# Altium footprint library huan_basic.PcbLib: 138 footprints (part 5 of 9)
Each footprint in its own frame and in the unit in brackets; x right, y up, seen from the top. Pads: shape width x height; smd on the part's side, far side on the other; paste and mask are expansions set on the pad; w line width, h text height; cw(c..) or ccw(c..) is an arc to the next point about the centre after c.
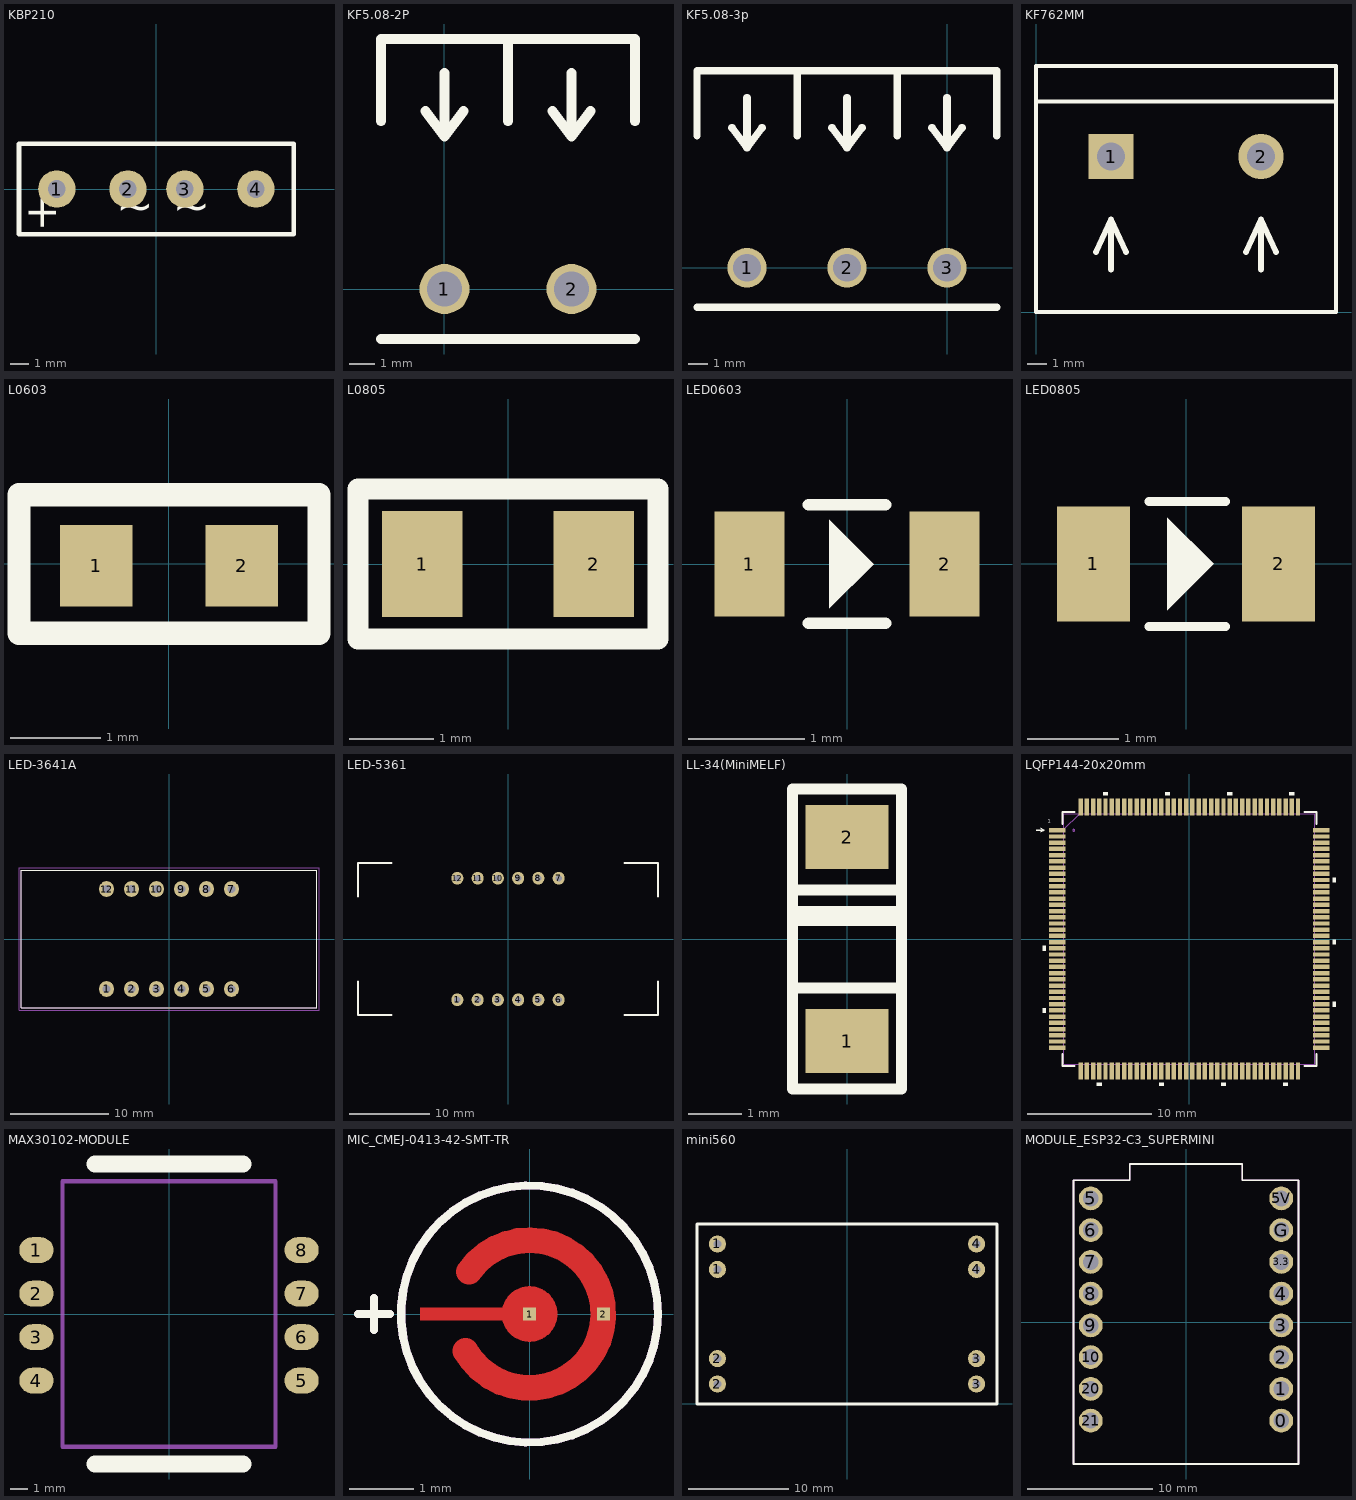
[diagram p4: the footprints below, top view; thin cyan lines are the x and y axes]

## KBP210 [mm]
pads (4):
  round 2 hole 0.94: 1(-5.334,0) 2(-1.524,0) 3(1.524,0) 4(5.334,0)
Top Overlay:
  lines w0.254: -7.36,-2.422 -7.36,2.423 7.36,2.423 7.36,-2.422 -7.36,-2.422
  text "~" at 0.889,-2.341 h3
  text "~" at -2.159,-2.341 h3
  text "-" at 5.715,-1.182 h3
  text "+" at -4.786,-2.286 h3
3D body "KBPM.stp": height 12.19, standoff -3.99, extent -7.36,-2.422 7.36,2.423

## KF5.08-2P [mm]
pads (2):
  round 2 hole 1.4: 1(0,0) 2(5.08,0)
Top Overlay:
  lines w0.381: -2.54,-2 7.62,-2 ; -2.54,6.706 -2.54,10 7.62,10 7.62,6.706 ; 2.54,6.706 2.54,10
  lines w0.4: 4.318,7.112 5.08,6.096 ; 5.08,8.636 5.08,6.096 ; 5.842,7.112 5.08,6.096 ; 0,6.096 0,8.636 0,6.096 ; 0,6.096 0.762,7.112 0,6.096 ; 0,6.096 -0.762,7.112 0,6.096
3D body "2P.STEP": height 8.3, standoff -3.9, extent -2.54,-2 7.62,10

## KF5.08-3p [mm]
pads (3):
  round 2 hole 1.4: 1(-10.16,0) 2(-5.08,0) 3(0,0)
Top Overlay:
  lines w0.381: -12.7,-2 2.54,-2 ; -12.7,6.706 -12.7,10 2.54,10 2.54,6.706 ; -7.62,6.706 -7.62,10 ; -2.54,6.706 -2.54,10
  lines w0.4: -10.922,7.112 -10.16,6.096 ; -10.16,8.636 -10.16,6.096 ; -9.398,7.112 -10.16,6.096 ; -5.842,7.112 -5.08,6.096 ; -5.08,8.636 -5.08,6.096 ; -4.318,7.112 -5.08,6.096 ; -0.762,7.112 0,6.096 ; 0,8.636 0,6.096 ; 0.762,7.112 0,6.096
3D body "3P.STEP": height 8.3, standoff -3.9, extent -12.7,-2 2.54,10

## KF762MM [mm]
height 21.7
pads (2):
  rect 2.3x2.3 hole 1.4: 1(3.81,7.9)
  round 2.3 hole 1.4: 2(11.43,7.9)
Top Overlay:
  lines w0.1: 15.24,11.209 15.24,12.5
  lines w0.2: 0,10.701 15.24,10.701 ; 0,0 15.24,0 15.24,12.5 0,12.5 0,0
  lines w0.3: 10.668,3.048 11.43,4.699 ; 11.43,2.159 11.43,4.699 ; 12.192,3.048 11.43,4.699 ; 3.81,4.699 4.572,3.048 3.81,4.699 ; 3.81,4.699 3.048,3.048 3.81,4.699 ; 3.81,4.699 3.81,2.159 3.81,4.699
Mechanical 13:
  lines w0.127: 0,0 15.24,0 15.24,12.5 0,12.5 0,0
3D body "1868076.stp": height 21.5, standoff -5, extent -0.609,0 15.201,12.5

## L0603 [mm]
pads (2):
  rect 0.8x0.9 smd: 1(-0.8,-0.019) 2(0.8,-0.019)
Top Overlay:
  lines w0.254: -1.651,-0.762 -1.651,0.762 1.651,0.762 1.651,-0.762 -1.651,-0.762
3D body "ferrite_bead_0603.STEP": height 0.8, standoff 0, extent -0.8,-0.419 0.8,0.381

## L0805 [mm]
pads (2):
  rect 0.95x1.26 smd: 1(-1.016,0) 2(1.016,0)
Top Overlay:
  lines w0.254: -1.778,-0.889 -1.778,0.889 1.778,0.889 1.778,-0.889 -1.778,-0.889
3D body "ferrite_bead_0805.STEP": height 0.9, standoff 0, extent -1,-0.61 1,0.59

## LED0603 [mm]
pads (2):
  rect 0.6x0.9 smd: 1(-0.838,0) 2(0.838,0)
Top Overlay:
  region: -0.152,0.381 0.229,0 -0.152,-0.381
  lines w0.1: -0.33,-0.508 0.33,-0.508 ; -0.33,0.508 0.33,0.508
3D body "LED0603.STEP": height 0.6, standoff 0, extent -0.81,-0.4 0.81,0.4

## LED0805 [mm]
pads (2):
  rect 0.8x1.26 smd: 1(-1.016,0) 2(1.016,0)
Top Overlay:
  region: -0.203,0.508 0.305,0 -0.203,-0.508
  lines w0.1: -0.406,-0.686 0.432,-0.686 ; -0.406,0.686 0.432,0.686
3D body "LED0805.STEP": height 1.1, standoff 0, extent -1.01,-0.625 1.01,0.625

## LED-3641A [mm]
height 7.2
pads (12):
  oval 1.5x1.6 hole 0.8: 1(-6.35,-5.08) 2(-3.81,-5.08) 3(-1.27,-5.08) 4(1.27,-5.08) 5(3.81,-5.08) 6(6.35,-5.08) 7(6.35,5.08) 8(3.81,5.08) 9(1.27,5.08) 10(-1.27,5.08) 11(-3.81,5.08) 12(-6.35,5.08)
Top Overlay:
  lines w0.127: -15,-7 -15,7 15,7 15,-7 -15,-7
Mechanical 13:
  lines w0.127: -15,-7 -15,7 15,7 15,-7 -15,-7
Mechanical 15:
  lines w0.05: -15.25,-7.25 -15.25,7.25 15.25,7.25 15.25,-7.25 -15.25,-7.25
3D body "step_temp.STEP": height 7.2, standoff -7.2, extent -15,-7 15,7

## LED-5361 [mm]
height 7.2
pads (12):
  oval 1.5x1.6 hole 0.8: 1(-6.35,-7.62) 2(-3.81,-7.62) 3(-1.27,-7.62) 4(1.27,-7.62) 5(3.81,-7.62) 6(6.35,-7.62) 7(6.35,7.62) 8(3.81,7.62) 9(1.27,7.62) 10(-1.27,7.62) 11(-3.81,7.62) 12(-6.35,7.62)
Top Overlay:
  lines w0.254: -18.8,-5.305 -18.8,-9.5 -14.605,-9.5 ; -18.8,5.305 -18.8,9.5 -14.605,9.5 ; 14.605,-9.5 18.8,-9.5 18.8,-5.305 ; 14.605,9.5 18.8,9.5 18.8,5.305
3D body "User Library-5631_Red_jam.step": height 8.1, standoff -5.5, extent -18.8,-9.5 18.8,9.5

## LL-34(MiniMELF) [mm]
pads (2):
  rect 1.55x1.2 smd: 1(0,-1.9) 2(0,1.9)
Top Overlay:
  rectangle: -1.016,0.241 1.016,0.619
  lines w0.2: -1.016,-0.914 1.016,-0.914 ; -1.016,0.914 1.016,0.914 ; -1.016,-2.794 -1.016,0 -1.016,2.794 1.016,2.794 1.016,-2.794 -1.016,-2.794
3D body "MiniMelfDiode.stp": height 1.63, standoff 0.04, extent -0.797,-1.85 0.797,1.85

## LQFP144-20x20mm [mm]
pads (144):
  rect 1.346x0.356 smd paste-0.673 mask-0.673: 1(-10.625,8.75) 2(-10.625,8.25) 3(-10.625,7.75) 4(-10.625,7.25) 5(-10.625,6.75) 6(-10.625,6.25) 7(-10.625,5.75) 8(-10.625,5.25) 9(-10.625,4.75) 10(-10.625,4.25) 11(-10.625,3.75) 12(-10.625,3.25) 13(-10.625,2.75) 14(-10.625,2.25) 15(-10.625,1.75) 16(-10.625,1.25) 17(-10.625,0.75) 18(-10.625,0.25) 19(-10.625,-0.25) 20(-10.625,-0.75) 21(-10.625,-1.25) 22(-10.625,-1.75) 23(-10.625,-2.25) 24(-10.625,-2.75) 25(-10.625,-3.25) 26(-10.625,-3.75) 27(-10.625,-4.25) 28(-10.625,-4.75) 29(-10.625,-5.25) 30(-10.625,-5.75) 31(-10.625,-6.25) 32(-10.625,-6.75) 33(-10.625,-7.25) 34(-10.625,-7.75) 35(-10.625,-8.25) 36(-10.625,-8.75) 73(10.625,-8.75) 74(10.625,-8.25) 75(10.625,-7.75) 76(10.625,-7.25) 77(10.625,-6.75) 78(10.625,-6.25) 79(10.625,-5.75) 80(10.625,-5.25) 81(10.625,-4.75) 82(10.625,-4.25) 83(10.625,-3.75) 84(10.625,-3.25) 85(10.625,-2.75) 86(10.625,-2.25) 87(10.625,-1.75) 88(10.625,-1.25) 89(10.625,-0.75) 90(10.625,-0.25) 91(10.625,0.25) 92(10.625,0.75) 93(10.625,1.25) 94(10.625,1.75) 95(10.625,2.25) 96(10.625,2.75) 97(10.625,3.25) 98(10.625,3.75) 99(10.625,4.25) 100(10.625,4.75) 101(10.625,5.25) 102(10.625,5.75) 103(10.625,6.25) 104(10.625,6.75) 105(10.625,7.25) 106(10.625,7.75) 107(10.625,8.25) 108(10.625,8.75)
  rect 0.356x1.346 smd paste-0.673 mask-0.673: 37(-8.75,-10.625) 38(-8.25,-10.625) 39(-7.75,-10.625) 40(-7.25,-10.625) 41(-6.75,-10.625) 42(-6.25,-10.625) 43(-5.75,-10.625) 44(-5.25,-10.625) 45(-4.75,-10.625) 46(-4.25,-10.625) 47(-3.75,-10.625) 48(-3.25,-10.625) 49(-2.75,-10.625) 50(-2.25,-10.625) 51(-1.75,-10.625) 52(-1.25,-10.625) 53(-0.75,-10.625) 54(-0.25,-10.625) 55(0.25,-10.625) 56(0.75,-10.625) 57(1.25,-10.625) 58(1.75,-10.625) 59(2.25,-10.625) 60(2.75,-10.625) 61(3.25,-10.625) 62(3.75,-10.625) 63(4.25,-10.625) 64(4.75,-10.625) 65(5.25,-10.625) 66(5.75,-10.625) 67(6.25,-10.625) 68(6.75,-10.625) 69(7.25,-10.625) 70(7.75,-10.625) 71(8.25,-10.625) 72(8.75,-10.625) 109(8.75,10.625) 110(8.25,10.625) 111(7.75,10.625) 112(7.25,10.625) 113(6.75,10.625) 114(6.25,10.625) 115(5.75,10.625) 116(5.25,10.625) 117(4.75,10.625) 118(4.25,10.625) 119(3.75,10.625) 120(3.25,10.625) 121(2.75,10.625) 122(2.25,10.625) 123(1.75,10.625) 124(1.25,10.625) 125(0.75,10.625) 126(0.25,10.625) 127(-0.25,10.625) 128(-0.75,10.625) 129(-1.25,10.625) 130(-1.75,10.625) 131(-2.25,10.625) 132(-2.75,10.625) 133(-3.25,10.625) 134(-3.75,10.625) 135(-4.25,10.625) 136(-4.75,10.625) 137(-5.25,10.625) 138(-5.75,10.625) 139(-6.25,10.625) 140(-6.75,10.625) 141(-7.25,10.625) 142(-7.75,10.625) 143(-8.25,10.625) 144(-8.75,10.625)
Top Overlay:
  region: -11.552,-0.56 -11.806,-0.56 -11.806,-0.941 -11.552,-0.941
  region: -11.552,-5.56 -11.806,-5.56 -11.806,-5.941 -11.552,-5.941
  region: -7.06,-11.552 -7.441,-11.552 -7.441,-11.806 -7.06,-11.806
  region: -2.06,-11.552 -2.441,-11.552 -2.441,-11.806 -2.06,-11.806
  region: 2.94,-11.552 2.559,-11.552 2.559,-11.806 2.94,-11.806
  region: 7.94,-11.552 7.559,-11.552 7.559,-11.806 7.94,-11.806
  region: 11.552,-5.059 11.806,-5.059 11.806,-5.44 11.552,-5.44
  region: 11.552,-0.059 11.806,-0.059 11.806,-0.44 11.552,-0.44
  region: 11.552,4.941 11.806,4.941 11.806,4.56 11.552,4.56
  region: 8.441,11.552 8.06,11.552 8.06,11.806 8.441,11.806
  region: 3.441,11.552 3.06,11.552 3.06,11.806 3.441,11.806
  region: -1.559,11.552 -1.94,11.552 -1.94,11.806 -1.559,11.806
  region: -6.559,11.552 -6.94,11.552 -6.94,11.806 -6.559,11.806
  lines w0.12: -12.344,8.763 -11.684,8.763 ; -11.962,8.624 -11.684,8.763 ; -11.684,8.763 -11.962,8.902 -11.684,8.763
  lines w0.152: -10.223,-9.261 -10.223,-10.223 -9.261,-10.223 ; -10.223,9.261 -10.223,10.223 -9.261,10.223 ; 9.261,-10.223 10.223,-10.223 10.223,-9.261 ; 9.261,10.223 10.223,10.223 10.223,9.261
  text "1" at -11.382,9.242 h0.5
Mechanical 13:
  circle w0.025: c-9.317,8.75 r0.076
  lines w0.025: -10.096,8.826 -8.826,10.096 ; -10.096,-10.096 10.096,-10.096 10.096,10.096 -10.096,10.096 -10.096,-10.096
3D body "LQFP144-20x20mm.step": height 1.6, standoff 0, extent -10.948,-10.948 10.948,10.948

## MAX30102-MODULE [mm]
pads (8):
  oval 2x1.5 smd: 1(-7.747,3.734) 2(-7.747,1.194) 3(-7.747,-1.346) 4(-7.747,-3.886) 5(7.747,-3.886) 6(7.747,-1.346) 7(7.747,1.194) 8(7.747,3.734)
Top Overlay:
  lines w1: -4.318,-8.763 0,-8.763 4.318,-8.763 ; -4.318,8.763 0,8.763 4.318,8.763
Mechanical 1:
  lines w0.254: -6.223,-7.747 0,-7.747 6.223,-7.747 6.223,0 6.223,7.747 0,7.747 -6.223,7.747 -6.223,0 -6.223,-7.747
3D body "MAX30102_MH_ET_LIVE_BOARD_v8.step": height 2.5, standoff 0, extent -7.8,-10.25 7.8,10.25

## MIC_CMEJ-0413-42-SMT-TR [mm]
height 1.63
pads (2):
  rect 0.2x0.2 smd paste-1 mask+0: 1(0,0) 2(1.15,0)
Top Layer:
  region: 0.023,0.429 0.045,0.428 0.067,0.425 0.089,0.421 0.111,0.415 0.133,0.409 0.154,0.401 0.175,0.393 0.195,0.383 0.215,0.372 0.234,0.361 0.253,0.348 0.271,0.334 0.288,0.32 0.304,0.304 0.32,0.288 0.334,0.271 0.348,0.253 0.361,0.234 0.372,0.215 0.383,0.195 0.393,0.175 0.401,0.154 0.409,0.133 0.415,0.111 0.421,0.089 0.425,0.067 0.428,0.045 0.429,0.023 0.43,0 0.429,-0.023 0.428,-0.045 0.425,-0.067 0.421,-0.089 0.415,-0.111 0.409,-0.133 0.401,-0.154 0.393,-0.175 0.383,-0.195 0.372,-0.215 0.361,-0.234 0.348,-0.253 0.334,-0.271 0.32,-0.288 0.304,-0.304 0.288,-0.32 0.271,-0.334 0.253,-0.348 0.234,-0.361 0.215,-0.372 0.195,-0.383 0.175,-0.393 0.154,-0.401 0.133,-0.409 0.111,-0.415 0.089,-0.421 0.067,-0.425 0.045,-0.428 0.023,-0.429 0,-0.43 -0.019,-0.43 -0.038,-0.428 -0.057,-0.426 -0.077,-0.423 -0.095,-0.419 -0.114,-0.415 -0.133,-0.409 -0.151,-0.403 -0.169,-0.396 -0.186,-0.388 -0.203,-0.379 -0.22,-0.369 -0.236,-0.359 -0.252,-0.348 -0.268,-0.336 -0.282,-0.324 -0.297,-0.311 -0.31,-0.298 -0.323,-0.283 -0.336,-0.269 -0.347,-0.253 -0.358,-0.237 -0.369,-0.221 -0.378,-0.204 -0.387,-0.187 -0.395,-0.17 -0.402,-0.152 -0.409,-0.134 -0.414,-0.115 -0.418,-0.1 -1.7,-0.1 -1.7,0.1 -0.418,0.1 -0.414,0.115 -0.409,0.134 -0.402,0.152 -0.395,0.17 -0.387,0.187 -0.378,0.204 -0.369,0.221 -0.358,0.237 -0.347,0.253 -0.336,0.269 -0.323,0.283 -0.31,0.298 -0.297,0.311 -0.282,0.324 -0.268,0.336 -0.252,0.348 -0.236,0.359 -0.22,0.369 -0.203,0.379 -0.186,0.388 -0.169,0.396 -0.151,0.403 -0.133,0.409 -0.114,0.415 -0.095,0.419 -0.077,0.423 -0.057,0.426 -0.038,0.428 -0.019,0.43 0,0.43
  lines w0.4: -0.996,-0.575 ccw(c0,0) -0.942,0.66
Top Overlay:
  circle w0.127: c0,0 r2
  lines w0.127: -2.67,0 -2.17,0 ; -2.42,-0.25 -2.42,0.25
Top Solder:
  region: 0.023,0.429 0.045,0.428 0.067,0.425 0.089,0.421 0.111,0.415 0.133,0.409 0.154,0.401 0.175,0.393 0.195,0.383 0.215,0.372 0.234,0.361 0.253,0.348 0.271,0.334 0.288,0.32 0.304,0.304 0.32,0.288 0.334,0.271 0.348,0.253 0.361,0.234 0.372,0.215 0.383,0.195 0.393,0.175 0.401,0.154 0.409,0.133 0.415,0.111 0.421,0.089 0.425,0.067 0.428,0.045 0.429,0.023 0.43,0 0.429,-0.023 0.428,-0.045 0.425,-0.067 0.421,-0.089 0.415,-0.111 0.409,-0.133 0.401,-0.154 0.393,-0.175 0.383,-0.195 0.372,-0.215 0.361,-0.234 0.348,-0.253 0.334,-0.271 0.32,-0.288 0.304,-0.304 0.288,-0.32 0.271,-0.334 0.253,-0.348 0.234,-0.361 0.215,-0.372 0.195,-0.383 0.175,-0.393 0.154,-0.401 0.133,-0.409 0.111,-0.415 0.089,-0.421 0.067,-0.425 0.045,-0.428 0.023,-0.429 0,-0.43 -0.023,-0.429 -0.045,-0.428 -0.067,-0.425 -0.089,-0.421 -0.111,-0.415 -0.133,-0.409 -0.154,-0.401 -0.175,-0.393 -0.195,-0.383 -0.215,-0.372 -0.234,-0.361 -0.253,-0.348 -0.271,-0.334 -0.288,-0.32 -0.304,-0.304 -0.32,-0.288 -0.334,-0.271 -0.348,-0.253 -0.361,-0.234 -0.372,-0.215 -0.383,-0.195 -0.393,-0.175 -0.401,-0.154 -0.409,-0.133 -0.415,-0.111 -0.421,-0.089 -0.425,-0.067 -0.428,-0.045 -0.429,-0.023 -0.43,0 -0.429,0.023 -0.428,0.045 -0.425,0.067 -0.421,0.089 -0.415,0.111 -0.409,0.133 -0.401,0.154 -0.393,0.175 -0.383,0.195 -0.372,0.215 -0.361,0.234 -0.348,0.253 -0.334,0.271 -0.32,0.288 -0.304,0.304 -0.288,0.32 -0.271,0.334 -0.253,0.348 -0.234,0.361 -0.215,0.372 -0.195,0.383 -0.175,0.393 -0.154,0.401 -0.133,0.409 -0.111,0.415 -0.089,0.421 -0.067,0.425 -0.045,0.428 -0.023,0.429 0,0.43
Mechanical 13:
  circle w0.127: c0,0 r2
  lines w0.127: -2.67,0 -2.17,0 ; -2.42,-0.25 -2.42,0.25
3D body "step_temp.STEP": height 1.4, standoff 0.03, extent -2,-1.999 2,1.999

## mini560 [mm]
pads (8):
  round 1.7 hole 0.8: 1(-12.954,13.462) 1(-12.954,16.002) 2(-12.954,1.998) 2(-12.954,4.538) 3(12.954,1.998) 3(12.954,4.538) 4(12.954,13.462) 4(12.954,16.002)
Top Overlay:
  lines w0.254: -15,0 15,0 15,18 -15,18 -15,0
3D body "MINI560_light.step": height 5.62, standoff 0, extent -15,0 15,18

## MODULE_ESP32-C3_SUPERMINI [mm]
height 4.2
pads (16):
  round 1.905 hole 1.27: 0(7.62,-7.88) 1(7.62,-5.34) 2(7.62,-2.8) 3(7.62,-0.26) 3.3(7.62,4.82) 4(7.62,2.28) 5(-7.62,9.9) 5V(7.62,9.9) 6(-7.62,7.36) 7(-7.62,4.82) 8(-7.62,2.28) 9(-7.62,-0.26) 10(-7.62,-2.8) 20(-7.62,-5.34) 21(-7.62,-7.88) G(7.62,7.36)
Top Overlay:
  lines w0.127: -9,-11.35 9,-11.35 9,11.35 4.5,11.35 4.5,12.65 -4.5,12.65 -4.5,11.35 -9,11.35 -9,-11.35
Mechanical 13:
  lines w0.127: -9,-11.35 9,-11.35 9,11.35 4.5,11.35 4.5,12.65 -4.5,12.65 -4.5,11.35 -9,11.35 -9,-11.35
3D body "step_temp.STEP": height 4.16, standoff 0, extent -9,-11.35 9,12.65